# Altium footprint library LED_ANGULAR.PcbLib: 1 footprints
Each footprint in its own frame and in the unit in brackets; x right, y up, seen from the top. Pads: shape width x height; smd on the part's side, far side on the other; paste and mask are expansions set on the pad; w line width, h text height; cw(c..) or ccw(c..) is an arc to the next point about the centre after c.
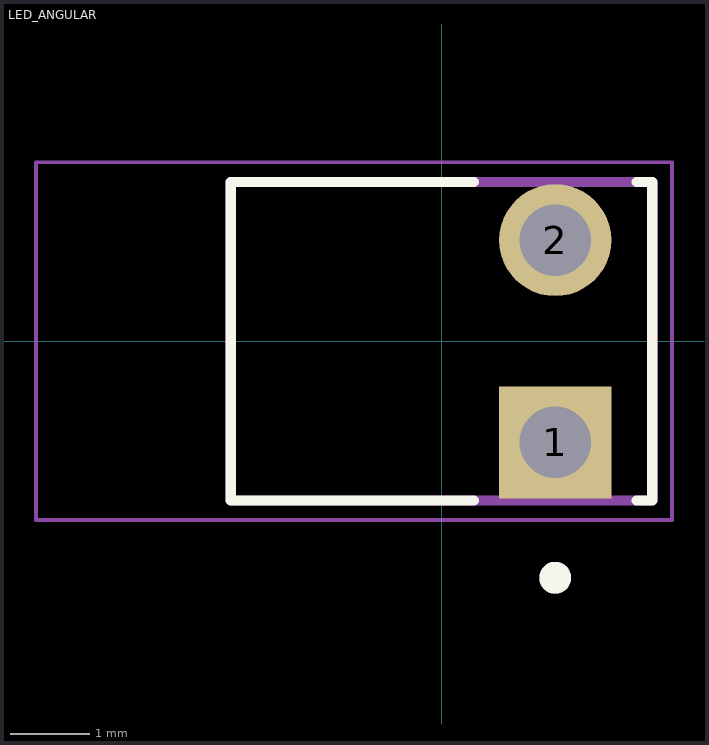
[diagram p0: the footprint, top view; thin cyan lines are the x and y axes]

## LED_ANGULAR [mm]
height 6.35
pads (2):
  rect 1.408x1.408 / inner round 1.408 / far side rect 1.408x1.408 hole 0.9: 1(1.43,-1.27)
  round 1.408 hole 0.9: 2(1.43,1.27)
Top Overlay:
  circle w0.2: c1.43,-2.974 r0.1
  lines w0.127: 0.406,-2 -2.65,-2 -2.65,2 0.406,2 ; 2.454,-2 2.65,-2 2.65,2 2.454,2
Mechanical 13:
  circle w0.2: c1.43,-2.974 r0.1
  lines w0.127: -2.65,-2 -2.65,2 2.65,2 2.65,-2 -2.65,-2
Mechanical 15:
  lines w0.05: -5.1,-2.25 -5.1,2.25 2.9,2.25 2.9,-2.25 -5.1,-2.25
3D body "step_temp.STEP": height 6.35, standoff -3.5, extent -4.85,-2 2.65,2